# Altium footprint library WR-TBL_Pluggable Connector_3.50mm.PcbLib: 175 footprints (part 9 of 11)
Each footprint in its own frame and in the unit in brackets; x right, y up, seen from the top. Pads: shape width x height; smd on the part's side, far side on the other; paste and mask are expansions set on the pad; w line width, h text height; cw(c..) or ccw(c..) is an arc to the next point about the centre after c.
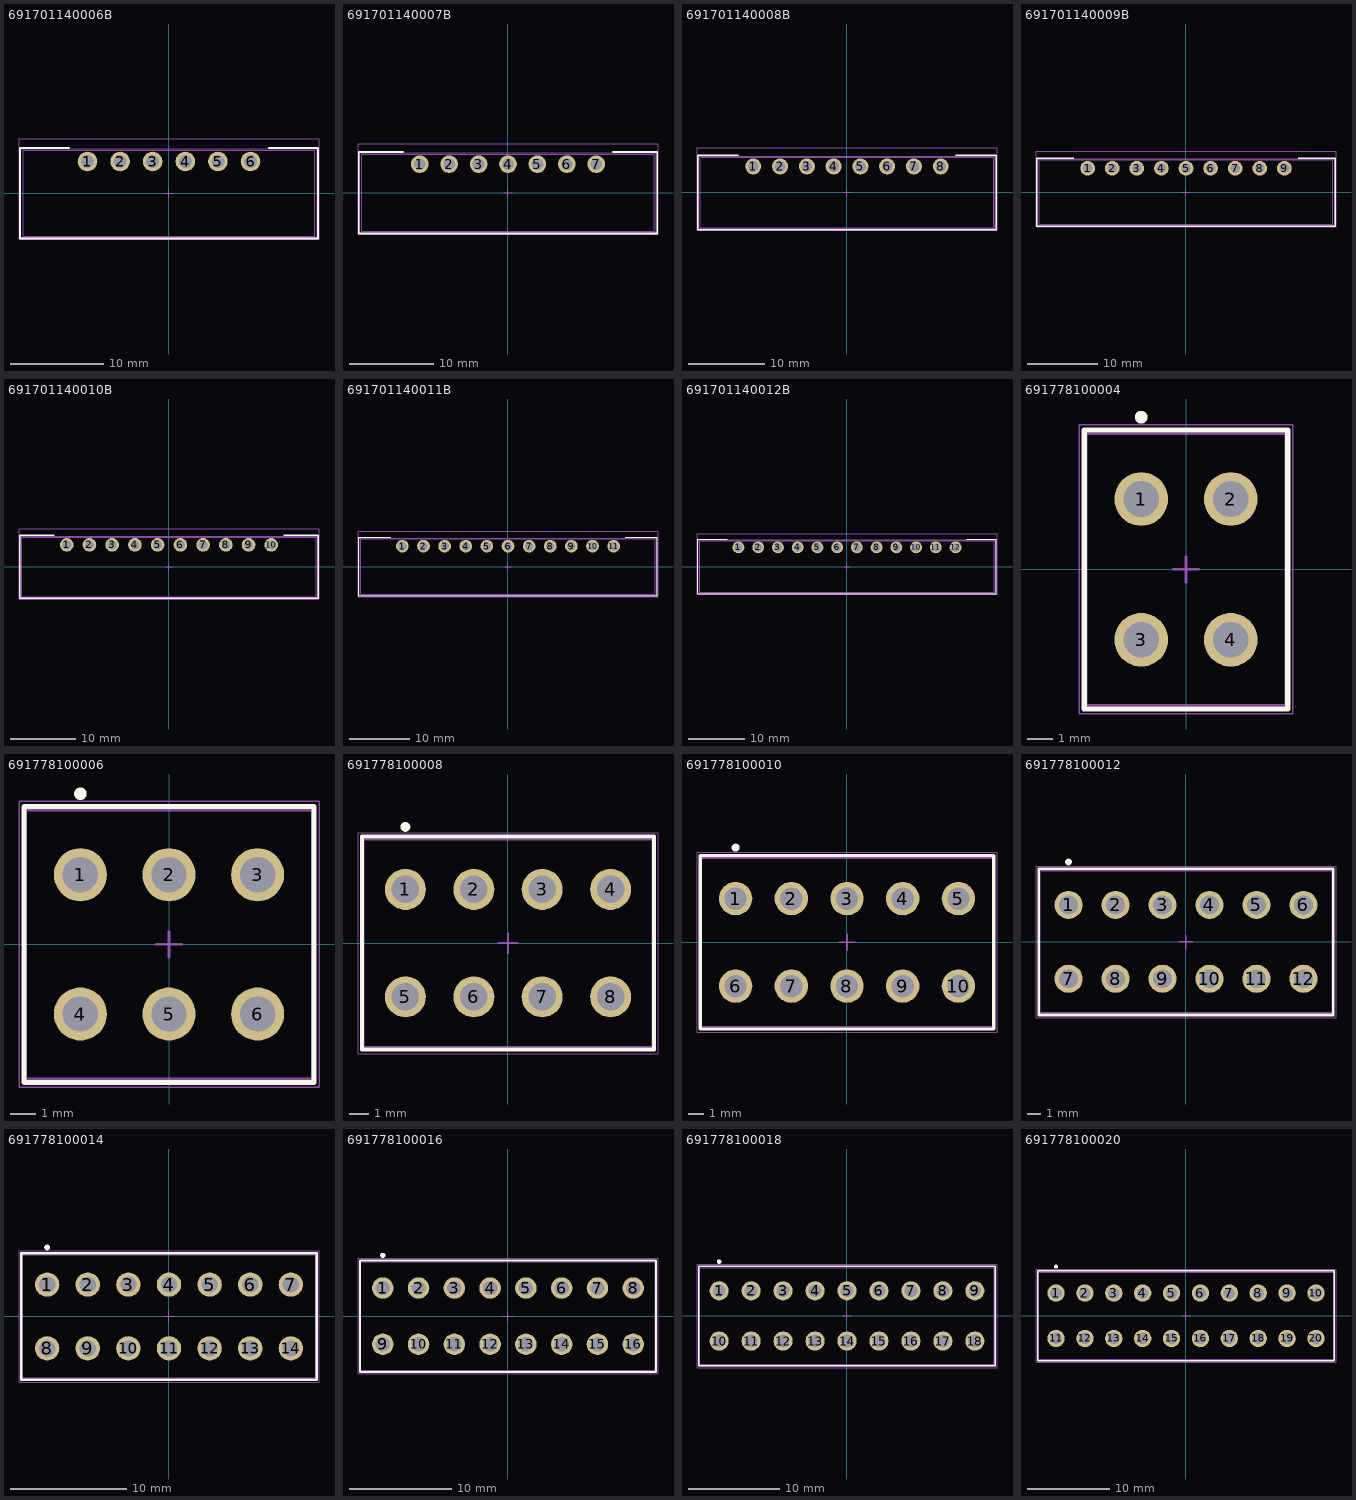
[diagram p8: the footprints below, top view; thin cyan lines are the x and y axes]

## 691701140006B [mm] "3.50 mm Horizontal PCB Header THR type with Flanges, 06p"
height 7
pads (6):
  round 2.1 hole 1.4: 1(-8.75,3.4) 2(-5.25,3.4) 3(-1.75,3.4) 4(1.75,3.4) 5(5.25,3.4) 6(8.75,3.4)
Top Overlay:
  lines w0.2: -10.7,4.85 -16,4.85 -16,-4.85 16,-4.85 16,4.85 10.7,4.85
Top Paste:
  region: 7.2,5.65 10.3,5.65 10.3,1.15 7.2,1.15
  region: 3.7,5.65 6.8,5.65 6.8,1.15 3.7,1.15
  region: 0.2,5.65 3.3,5.65 3.3,1.15 0.2,1.15
  region: -3.3,5.65 -0.2,5.65 -0.2,1.15 -3.3,1.15
  region: -6.8,5.65 -3.7,5.65 -3.7,1.15 -6.8,1.15
  region: -10.3,5.65 -7.2,5.65 -7.2,1.15 -10.3,1.15
Assembly Notes:
  text "Stencil thickness : 120 μm" at -5.156,-5.654 h1
Top Assembly:
  lines w0.1: -15.9,-4.75 15.9,-4.75 15.9,4.75 -15.9,4.75 -15.9,-4.75
Top Designator:
  text ".Designator" at -3.647,-0.357 h1
Top 3D Body:
  lines w0.1: -15.65,-4.6 15.65,-4.6 15.65,4.6 -15.65,4.6 -15.65,-4.6
Top Courtyard:
  lines w0.05: -16.1,-4.95 16.1,-4.95 16.1,5.85 -16.1,5.85 -16.1,-4.95
Top Component Center:
  lines w0.1: -0.5,0 0.5,0 ; 0,-0.5 0,0.5
3D body "691701140006B.stp": height 7.05, standoff -2.55, extent -15.65,-4.61 15.65,4.6

## 691701140007B [mm] "3.50 mm Horizontal PCB Header THR type with Flanges, 07p"
height 7
pads (7):
  round 2.1 hole 1.4: 1(-10.5,3.4) 2(-7,3.4) 3(-3.5,3.4) 4(0,3.4) 5(3.5,3.4) 6(7,3.4) 7(10.5,3.4)
Top Overlay:
  lines w0.2: -12.45,4.85 -17.75,4.85 -17.75,-4.85 17.75,-4.85 17.75,4.85 12.45,4.85
Top Paste:
  region: -12.05,5.65 -8.95,5.65 -8.95,1.15 -12.05,1.15
  region: -8.55,5.65 -5.45,5.65 -5.45,1.15 -8.55,1.15
  region: -5.05,5.65 -1.95,5.65 -1.95,1.15 -5.05,1.15
  region: -1.55,5.65 1.55,5.65 1.55,1.15 -1.55,1.15
  region: 1.95,5.65 5.05,5.65 5.05,1.15 1.95,1.15
  region: 5.45,5.65 8.55,5.65 8.55,1.15 5.45,1.15
  region: 8.95,5.65 12.05,5.65 12.05,1.15 8.95,1.15
Assembly Notes:
  text "Stencil thickness : 120 μm" at -5.156,-5.654 h1
Top Assembly:
  lines w0.1: -17.65,-4.75 17.65,-4.75 17.65,4.75 -17.65,4.75 -17.65,-4.75
Top Designator:
  text ".Designator" at -3.647,-0.357 h1
Top 3D Body:
  lines w0.1: -17.4,-4.6 17.4,-4.6 17.4,4.6 -17.4,4.6 -17.4,-4.6
Top Courtyard:
  lines w0.05: -17.85,-4.95 17.85,-4.95 17.85,5.85 -17.85,5.85 -17.85,-4.95
Top Component Center:
  lines w0.1: -0.5,0 0.5,0 ; 0,-0.5 0,0.5
3D body "691701140007B.stp": height 7.05, standoff -2.55, extent -17.4,-4.61 17.4,4.6

## 691701140008B [mm] "3.50 mm Horizontal PCB Header THR type with Flanges, 08p"
height 7
pads (8):
  round 2.1 hole 1.4: 1(-12.25,3.4) 2(-8.75,3.4) 3(-5.25,3.4) 4(-1.75,3.4) 5(1.75,3.4) 6(5.25,3.4) 7(8.75,3.4) 8(12.25,3.4)
Top Overlay:
  lines w0.2: -14.2,4.85 -19.5,4.85 -19.5,-4.85 19.5,-4.85 19.5,4.85 14.2,4.85
Top Paste:
  region: -13.8,5.65 -10.7,5.65 -10.7,1.15 -13.8,1.15
  region: -10.3,5.65 -7.2,5.65 -7.2,1.15 -10.3,1.15
  region: -6.8,5.65 -3.7,5.65 -3.7,1.15 -6.8,1.15
  region: -3.3,5.65 -0.2,5.65 -0.2,1.15 -3.3,1.15
  region: 0.2,5.65 3.3,5.65 3.3,1.15 0.2,1.15
  region: 3.7,5.65 6.8,5.65 6.8,1.15 3.7,1.15
  region: 7.2,5.65 10.3,5.65 10.3,1.15 7.2,1.15
  region: 10.7,5.65 13.8,5.65 13.8,1.15 10.7,1.15
Assembly Notes:
  text "Stencil thickness : 120 μm" at -5.156,-5.654 h1
Top Assembly:
  lines w0.1: -19.4,-4.75 19.4,-4.75 19.4,4.75 -19.4,4.75 -19.4,-4.75
Top Designator:
  text ".Designator" at -3.647,-0.357 h1
Top 3D Body:
  lines w0.1: -19.15,-4.6 19.15,-4.6 19.15,4.6 -19.15,4.6 -19.15,-4.6
Top Courtyard:
  lines w0.05: -19.6,-4.95 19.6,-4.95 19.6,5.85 -19.6,5.85 -19.6,-4.95
Top Component Center:
  lines w0.1: -0.5,0 0.5,0 ; 0,-0.5 0,0.5
3D body "691701140008B.stp": height 7.05, standoff -2.55, extent -19.15,-4.61 19.15,4.6

## 691701140009B [mm] "3.50 mm Horizontal PCB Header THR type with Flanges, 09p"
height 7
pads (9):
  round 2.1 hole 1.4: 1(-14,3.4) 2(-10.5,3.4) 3(-7,3.4) 4(-3.5,3.4) 5(0,3.4) 6(3.5,3.4) 7(7,3.4) 8(10.5,3.4) 9(14,3.4)
Top Overlay:
  lines w0.2: -15.95,4.85 -21.25,4.85 -21.25,-4.85 21.25,-4.85 21.25,4.85 15.95,4.85
Top Paste:
  region: 12.45,5.65 15.55,5.65 15.55,1.15 12.45,1.15
  region: 8.95,5.65 12.05,5.65 12.05,1.15 8.95,1.15
  region: 5.45,5.65 8.55,5.65 8.55,1.15 5.45,1.15
  region: 1.95,5.65 5.05,5.65 5.05,1.15 1.95,1.15
  region: -1.55,5.65 1.55,5.65 1.55,1.15 -1.55,1.15
  region: -5.05,5.65 -1.95,5.65 -1.95,1.15 -5.05,1.15
  region: -8.55,5.65 -5.45,5.65 -5.45,1.15 -8.55,1.15
  region: -12.05,5.65 -8.95,5.65 -8.95,1.15 -12.05,1.15
  region: -15.55,5.65 -12.45,5.65 -12.45,1.15 -15.55,1.15
Assembly Notes:
  text "Stencil thickness : 120 μm" at -5.156,-5.654 h1
Top Assembly:
  lines w0.1: -21.15,-4.75 -21.15,4.75 21.15,4.75 21.15,-4.75 -21.15,-4.75
Top Designator:
  text ".Designator" at -3.647,-0.357 h1
Top 3D Body:
  lines w0.1: -20.9,-4.6 -20.9,4.6 20.9,4.6 20.9,-4.6 -20.9,-4.6
Top Courtyard:
  lines w0.05: -21.35,-4.95 -21.35,5.85 21.35,5.85 21.35,-4.95 -21.35,-4.95
Top Component Center:
  lines w0.1: -0.5,0 0.5,0 ; 0,-0.5 0,0.5
3D body "691701140009B.stp": height 7.05, standoff -2.55, extent -20.9,-4.61 20.9,4.6

## 691701140010B [mm] "3.50 mm Horizontal PCB Header THR type with Flanges, 10p"
height 7
pads (10):
  round 2.1 hole 1.4: 1(-15.75,3.4) 2(-12.25,3.4) 3(-8.75,3.4) 4(-5.25,3.4) 5(-1.75,3.4) 6(1.75,3.4) 7(5.25,3.4) 8(8.75,3.4) 9(12.25,3.4) 10(15.75,3.4)
Top Overlay:
  lines w0.2: -17.7,4.85 -23,4.85 -23,-4.85 23,-4.85 23,4.85 17.7,4.85
Top Paste:
  region: -17.3,5.65 -14.2,5.65 -14.2,1.15 -17.3,1.15
  region: -13.8,5.65 -10.7,5.65 -10.7,1.15 -13.8,1.15
  region: -10.3,5.65 -7.2,5.65 -7.2,1.15 -10.3,1.15
  region: -6.8,5.65 -3.7,5.65 -3.7,1.15 -6.8,1.15
  region: -3.3,5.65 -0.2,5.65 -0.2,1.15 -3.3,1.15
  region: 0.2,5.65 3.3,5.65 3.3,1.15 0.2,1.15
  region: 3.7,5.65 6.8,5.65 6.8,1.15 3.7,1.15
  region: 7.2,5.65 10.3,5.65 10.3,1.15 7.2,1.15
  region: 10.7,5.65 13.8,5.65 13.8,1.15 10.7,1.15
  region: 14.2,5.65 17.3,5.65 17.3,1.15 14.2,1.15
Assembly Notes:
  text "Stencil thickness : 120 μm" at -5.156,-5.654 h1
Top Assembly:
  lines w0.1: -22.9,-4.75 -22.9,4.75 22.9,4.75 22.9,-4.75 -22.9,-4.75
Top Designator:
  text ".Designator" at -3.647,-0.357 h1
Top 3D Body:
  lines w0.1: -22.65,-4.6 -22.65,4.6 22.65,4.6 22.65,-4.6 -22.65,-4.6
Top Courtyard:
  lines w0.05: -23.1,-4.95 -23.1,5.85 23.1,5.85 23.1,-4.95 -23.1,-4.95
Top Component Center:
  lines w0.1: -0.5,0 0.5,0 ; 0,-0.5 0,0.5
3D body "691701140010B.stp": height 7.05, standoff -2.55, extent -22.65,-4.61 22.65,4.6

## 691701140011B [mm] "3.50 mm Horizontal PCB Header THR type with Flanges, 11p"
height 7
pads (11):
  round 2.1 hole 1.4: 1(-17.5,3.4) 2(-14,3.4) 3(-10.5,3.4) 4(-7,3.4) 5(-3.5,3.4) 6(0,3.4) 7(3.5,3.4) 8(7,3.4) 9(10.5,3.4) 10(14,3.4) 11(17.5,3.4)
Top Overlay:
  lines w0.2: -19.45,4.85 -24.75,4.85 -24.75,-4.85 24.75,-4.85 24.75,4.85 19.45,4.85
Top Paste:
  region: -19.05,5.65 -15.95,5.65 -15.95,1.15 -19.05,1.15
  region: -15.55,5.65 -12.45,5.65 -12.45,1.15 -15.55,1.15
  region: -12.05,5.65 -8.95,5.65 -8.95,1.15 -12.05,1.15
  region: -8.55,5.65 -5.45,5.65 -5.45,1.15 -8.55,1.15
  region: -5.05,5.65 -1.95,5.65 -1.95,1.15 -5.05,1.15
  region: -1.55,5.65 1.55,5.65 1.55,1.15 -1.55,1.15
  region: 1.95,5.65 5.05,5.65 5.05,1.15 1.95,1.15
  region: 5.45,5.65 8.55,5.65 8.55,1.15 5.45,1.15
  region: 8.95,5.65 12.05,5.65 12.05,1.15 8.95,1.15
  region: 12.45,5.65 15.55,5.65 15.55,1.15 12.45,1.15
  region: 15.95,5.65 19.05,5.65 19.05,1.15 15.95,1.15
Assembly Notes:
  text "Stencil thickness : 120 μm" at -5.156,-5.654 h1
Top Assembly:
  lines w0.1: -24.65,-4.75 -24.65,4.75 24.65,4.75 24.65,-4.75 -24.65,-4.75
Top Designator:
  text ".Designator" at -3.647,-0.357 h1
Top 3D Body:
  lines w0.1: -24.4,-4.6 -24.4,4.6 24.4,4.6 24.4,-4.6 -24.4,-4.6
Top Courtyard:
  lines w0.05: -24.85,-4.95 -24.85,5.85 24.85,5.85 24.85,-4.95 -24.85,-4.95
Top Component Center:
  lines w0.1: -0.5,0 0.5,0 ; 0,-0.5 0,0.5
3D body "691701140011B.stp": height 7.05, standoff -2.55, extent -24.4,-4.61 24.4,4.6

## 691701140012B [mm] "3.50 mm Horizontal PCB Header THR type with Flanges, 12p"
height 7
pads (12):
  round 2.1 hole 1.4: 1(-19.25,3.4) 2(-15.75,3.4) 3(-12.25,3.4) 4(-8.75,3.4) 5(-5.25,3.4) 6(-1.75,3.4) 7(1.75,3.4) 8(5.25,3.4) 9(8.75,3.4) 10(12.25,3.4) 11(15.75,3.4) 12(19.25,3.4)
Top Overlay:
  lines w0.2: -21.2,4.85 -26.5,4.85 -26.5,-4.85 26.5,-4.85 26.5,4.85 21.2,4.85
Top Paste:
  region: -20.8,5.65 -17.7,5.65 -17.7,1.15 -20.8,1.15
  region: -17.3,5.65 -14.2,5.65 -14.2,1.15 -17.3,1.15
  region: -13.8,5.65 -10.7,5.65 -10.7,1.15 -13.8,1.15
  region: -10.3,5.65 -7.2,5.65 -7.2,1.15 -10.3,1.15
  region: -6.8,5.65 -3.7,5.65 -3.7,1.15 -6.8,1.15
  region: -3.3,5.65 -0.2,5.65 -0.2,1.15 -3.3,1.15
  region: 0.2,5.65 3.3,5.65 3.3,1.15 0.2,1.15
  region: 3.7,5.65 6.8,5.65 6.8,1.15 3.7,1.15
  region: 7.2,5.65 10.3,5.65 10.3,1.15 7.2,1.15
  region: 10.7,5.65 13.8,5.65 13.8,1.15 10.7,1.15
  region: 14.2,5.65 17.3,5.65 17.3,1.15 14.2,1.15
  region: 17.7,5.65 20.8,5.65 20.8,1.15 17.7,1.15
Assembly Notes:
  text "Stencil thickness : 120 μm" at -5.156,-5.654 h1
Top Assembly:
  lines w0.1: -26.4,-4.75 -26.4,4.75 26.4,4.75 26.4,-4.75 -26.4,-4.75
Top Designator:
  text ".Designator" at -3.647,-0.357 h1
Top 3D Body:
  lines w0.1: -26.15,-4.6 -26.15,4.6 26.15,4.6 26.15,-4.6 -26.15,-4.6
Top Courtyard:
  lines w0.05: -26.6,-4.95 -26.6,5.85 26.6,5.85 26.6,-4.95 -26.6,-4.95
Top Component Center:
  lines w0.1: -0.5,0 0.5,0 ; 0,-0.5 0,0.5
3D body "691701140012B.stp": height 7.05, standoff -2.55, extent -26.15,-4.61 26.15,4.6

## 691778100004 [mm] "PCB Header, pitch 3.5mm, 04p"
height 10
pads (4):
  round 2.1 hole 1.4: 1(-1.75,2.75) 2(1.75,2.75) 3(-1.75,-2.75) 4(1.75,-2.75)
Top Overlay:
  circle w0.25: c-1.75,5.95 r0.125
  lines w0.2: -3.975,-5.45 3.975,-5.45 3.975,5.45 -3.975,5.45 -3.975,-5.45
Top Paste:
  region: 0.25,-0.45 3.25,-0.45 3.25,-5.05 0.25,-5.05
  region: -3.25,-0.45 -0.25,-0.45 -0.25,-5.05 -3.25,-5.05
  region: 0.25,5.05 3.25,5.05 3.25,0.45 0.25,0.45
  region: -3.25,5.05 -0.25,5.05 -0.25,0.45 -3.25,0.45
Top Assembly:
  lines w0.1: -3.975,-5.45 3.975,-5.45 3.975,5.45 -3.975,5.45 -3.975,-5.45
Top Designator:
  text ".Designator" at -3.647,-0.357 h1
Top 3D Body:
  lines w0.1: -3.9,-5.3 -3.9,5.3 3.9,5.3 3.9,-5.3 -3.9,-5.3
Top Courtyard:
  lines w0.05: -4.175,-5.65 -4.175,5.65 4.175,5.65 4.175,-5.65 -4.175,-5.65
Top Component Center:
  lines w0.1: -0.5,0 0.5,0 ; 0,-0.5 0,0.5
3D body "691778100004.stp": height 10.02, standoff -1.98, extent -3.9,-5.3 3.9,5.3

## 691778100006 [mm] "PCB Header, pitch 3.5mm, 06p"
height 10
pads (6):
  round 2.1 hole 1.4: 1(-3.5,2.75) 2(0,2.75) 3(3.5,2.75) 4(-3.5,-2.75) 5(0,-2.75) 6(3.5,-2.75)
Top Overlay:
  circle w0.25: c-3.5,5.95 r0.125
  lines w0.2: -5.725,-5.45 -5.725,5.45 5.725,5.45 5.725,-5.45 -5.725,-5.45
Top Paste:
  region: 2,-0.45 5,-0.45 5,-5.05 2,-5.05
  region: -1.5,-0.45 1.5,-0.45 1.5,-5.05 -1.5,-5.05
  region: -5,5.05 -2,5.05 -2,0.45 -5,0.45
  region: -1.5,5.05 1.5,5.05 1.5,0.45 -1.5,0.45
  region: 2,5.05 5,5.05 5,0.45 2,0.45
  region: -5,-0.45 -2,-0.45 -2,-5.05 -5,-5.05
Top Assembly:
  lines w0.1: -5.725,-5.45 -5.725,5.45 5.725,5.45 5.725,-5.45 -5.725,-5.45
Top Designator:
  text ".Designator" at -3.647,-0.357 h1
Top 3D Body:
  lines w0.1: -5.65,-5.3 5.65,-5.3 5.65,5.3 -5.65,5.3 -5.65,-5.3
Top Courtyard:
  lines w0.05: -5.925,-5.65 5.925,-5.65 5.925,5.65 -5.925,5.65 -5.925,-5.65
Top Component Center:
  lines w0.1: -0.5,0 0.5,0 ; 0,-0.5 0,0.5
3D body "691778100006.stp": height 10.02, standoff -2.73, extent -5.65,-5.3 5.65,5.3

## 691778100008 [mm] "PCB Header, pitch 3.5mm, 08p"
height 10
pads (8):
  round 2.1 hole 1.4: 1(-5.25,2.75) 2(-1.75,2.75) 3(1.75,2.75) 4(5.25,2.75) 5(-5.25,-2.75) 6(-1.75,-2.75) 7(1.75,-2.75) 8(5.25,-2.75)
Top Overlay:
  circle w0.25: c-5.25,5.95 r0.125
  lines w0.2: -7.475,-5.45 7.475,-5.45 7.475,5.45 -7.475,5.45 -7.475,-5.45
Top Paste:
  region: 3.75,5.05 6.75,5.05 6.75,0.45 3.75,0.45
  region: 0.25,5.05 3.25,5.05 3.25,0.45 0.25,0.45
  region: -3.25,5.05 -0.25,5.05 -0.25,0.45 -3.25,0.45
  region: -6.75,5.05 -3.75,5.05 -3.75,0.45 -6.75,0.45
  region: -6.75,-0.45 -3.75,-0.45 -3.75,-5.05 -6.75,-5.05
  region: -3.25,-0.45 -0.25,-0.45 -0.25,-5.05 -3.25,-5.05
  region: 0.25,-0.45 3.25,-0.45 3.25,-5.05 0.25,-5.05
  region: 3.75,-0.45 6.75,-0.45 6.75,-5.05 3.75,-5.05
Top Assembly:
  lines w0.1: -7.475,-5.45 7.475,-5.45 7.475,5.45 -7.475,5.45 -7.475,-5.45
Top Designator:
  text ".Designator" at -3.647,-0.357 h1
Top 3D Body:
  lines w0.1: -7.4,-5.3 -7.4,5.3 7.4,5.3 7.4,-5.3 -7.4,-5.3
Top Courtyard:
  lines w0.05: -7.675,-5.65 -7.675,5.65 7.675,5.65 7.675,-5.65 -7.675,-5.65
Top Component Center:
  lines w0.1: -0.5,0 0.5,0 ; 0,-0.5 0,0.5
3D body "691778100008.stp": height 10.02, standoff -2.73, extent -7.4,-5.3 7.4,5.3

## 691778100010 [mm] "PCB Header, pitch 3.5mm, 10p"
height 10
pads (10):
  round 2.1 hole 1.4: 1(-7,2.75) 2(-3.5,2.75) 3(0,2.75) 4(3.5,2.75) 5(7,2.75) 6(-7,-2.75) 7(-3.5,-2.75) 8(0,-2.75) 9(3.5,-2.75) 10(7,-2.75)
Top Overlay:
  circle w0.25: c-7,5.95 r0.125
  lines w0.2: -9.225,-5.45 9.225,-5.45 9.225,5.45 -9.225,5.45 -9.225,-5.45
Top Paste:
  region: 5.5,-0.45 8.5,-0.45 8.5,-5.05 5.5,-5.05
  region: 2,-0.45 5,-0.45 5,-5.05 2,-5.05
  region: 2,5.05 5,5.05 5,0.45 2,0.45
  region: -1.5,5.05 1.5,5.05 1.5,0.45 -1.5,0.45
  region: -5,5.05 -2,5.05 -2,0.45 -5,0.45
  region: -8.5,5.05 -5.5,5.05 -5.5,0.45 -8.5,0.45
  region: 5.5,5.05 8.5,5.05 8.5,0.45 5.5,0.45
  region: -8.5,-0.45 -5.5,-0.45 -5.5,-5.05 -8.5,-5.05
  region: -5,-0.45 -2,-0.45 -2,-5.05 -5,-5.05
  region: -1.5,-0.45 1.5,-0.45 1.5,-5.05 -1.5,-5.05
Top Assembly:
  lines w0.1: -9.225,-5.45 9.225,-5.45 9.225,5.45 -9.225,5.45 -9.225,-5.45
Top Designator:
  text ".Designator" at -3.647,-0.357 h1
Top 3D Body:
  lines w0.1: -9.15,-5.3 -9.15,5.3 9.15,5.3 9.15,-5.3 -9.15,-5.3
Top Courtyard:
  lines w0.05: -9.425,-5.65 -9.425,5.65 9.425,5.65 9.425,-5.65 -9.425,-5.65
Top Component Center:
  lines w0.1: -0.5,0 0.5,0 ; 0,-0.5 0,0.5
3D body "691778100010.stp": height 10.02, standoff -2.38, extent -9.15,-5.3 9.15,5.3

## 691778100012 [mm] "PCB Header, pitch 3.5mm, 12p"
height 10
pads (12):
  round 2.1 hole 1.4: 1(-8.75,2.75) 2(-5.25,2.75) 3(-1.75,2.75) 4(1.75,2.75) 5(5.25,2.75) 6(8.75,2.75) 7(-8.75,-2.75) 8(-5.25,-2.75) 9(-1.75,-2.75) 10(1.75,-2.75) 11(5.25,-2.75) 12(8.75,-2.75)
Top Overlay:
  circle w0.25: c-8.75,5.95 r0.125
  lines w0.2: -10.975,-5.45 10.975,-5.45 10.975,5.45 -10.975,5.45 -10.975,-5.45
Top Paste:
  region: 7.25,-0.45 10.25,-0.45 10.25,-5.05 7.25,-5.05
  region: 3.75,-0.45 6.75,-0.45 6.75,-5.05 3.75,-5.05
  region: 0.25,-0.45 3.25,-0.45 3.25,-5.05 0.25,-5.05
  region: -3.25,-0.45 -0.25,-0.45 -0.25,-5.05 -3.25,-5.05
  region: 0.25,5.05 3.25,5.05 3.25,0.45 0.25,0.45
  region: -3.25,5.05 -0.25,5.05 -0.25,0.45 -3.25,0.45
  region: -6.75,5.05 -3.75,5.05 -3.75,0.45 -6.75,0.45
  region: -10.25,5.05 -7.25,5.05 -7.25,0.45 -10.25,0.45
  region: 3.75,5.05 6.75,5.05 6.75,0.45 3.75,0.45
  region: 7.25,5.05 10.25,5.05 10.25,0.45 7.25,0.45
  region: -10.25,-0.45 -7.25,-0.45 -7.25,-5.05 -10.25,-5.05
  region: -6.75,-0.45 -3.75,-0.45 -3.75,-5.05 -6.75,-5.05
Top Assembly:
  lines w0.1: -10.975,-5.45 10.975,-5.45 10.975,5.45 -10.975,5.45 -10.975,-5.45
Top Designator:
  text ".Designator" at -3.647,-0.357 h1
Top 3D Body:
  lines w0.1: -10.9,-5.3 -10.9,5.3 10.9,5.3 10.9,-5.3 -10.9,-5.3
Top Courtyard:
  lines w0.05: -11.175,-5.65 -11.175,5.65 11.175,5.65 11.175,-5.65 -11.175,-5.65
Top Component Center:
  lines w0.1: -0.5,0 0.5,0 ; 0,-0.5 0,0.5
3D body "691778100012.stp": height 10.02, standoff -2.38, extent -10.9,-5.3 10.9,5.3

## 691778100014 [mm] "PCB Header, pitch 3.5mm, 14p"
height 10
pads (14):
  round 2.1 hole 1.4: 1(-10.5,2.75) 2(-7,2.75) 3(-3.5,2.75) 4(0,2.75) 5(3.5,2.75) 6(7,2.75) 7(10.5,2.75) 8(-10.5,-2.75) 9(-7,-2.75) 10(-3.5,-2.75) 11(0,-2.75) 12(3.5,-2.75) 13(7,-2.75) 14(10.5,-2.75)
Top Overlay:
  circle w0.25: c-10.5,5.95 r0.125
  lines w0.2: -12.725,-5.45 -12.725,5.45 12.725,5.45 12.725,-5.45 -12.725,-5.45
Top Paste:
  region: 9,-0.45 12,-0.45 12,-5.05 9,-5.05
  region: 5.5,-0.45 8.5,-0.45 8.5,-5.05 5.5,-5.05
  region: -12,-0.45 -9,-0.45 -9,-5.05 -12,-5.05
  region: 9,5.05 12,5.05 12,0.45 9,0.45
  region: 5.5,5.05 8.5,5.05 8.5,0.45 5.5,0.45
  region: 2,5.05 5,5.05 5,0.45 2,0.45
  region: -12,5.05 -9,5.05 -9,0.45 -12,0.45
  region: -8.5,5.05 -5.5,5.05 -5.5,0.45 -8.5,0.45
  region: -5,5.05 -2,5.05 -2,0.45 -5,0.45
  region: -1.5,5.05 1.5,5.05 1.5,0.45 -1.5,0.45
  region: -8.5,-0.45 -5.5,-0.45 -5.5,-5.05 -8.5,-5.05
  region: -5,-0.45 -2,-0.45 -2,-5.05 -5,-5.05
  region: -1.5,-0.45 1.5,-0.45 1.5,-5.05 -1.5,-5.05
  region: 2,-0.45 5,-0.45 5,-5.05 2,-5.05
Top Assembly:
  lines w0.1: -12.725,-5.45 -12.725,5.45 12.725,5.45 12.725,-5.45 -12.725,-5.45
Top Designator:
  text ".Designator" at -3.647,-0.357 h1
Top 3D Body:
  lines w0.1: -12.65,-5.3 12.65,-5.3 12.65,5.3 -12.65,5.3 -12.65,-5.3
Top Courtyard:
  lines w0.05: -12.925,-5.65 12.925,-5.65 12.925,5.65 -12.925,5.65 -12.925,-5.65
Top Component Center:
  lines w0.1: -0.5,0 0.5,0 ; 0,-0.5 0,0.5
3D body "691778100014.stp": height 10.02, standoff -2.73, extent -12.65,-5.3 12.65,5.3

## 691778100016 [mm] "PCB Header, pitch 3.5mm, 16p"
height 10
pads (16):
  round 2.1 hole 1.4: 1(-12.25,2.75) 2(-8.75,2.75) 3(-5.25,2.75) 4(-1.75,2.75) 5(1.75,2.75) 6(5.25,2.75) 7(8.75,2.75) 8(12.25,2.75) 9(-12.25,-2.75) 10(-8.75,-2.75) 11(-5.25,-2.75) 12(-1.75,-2.75) 13(1.75,-2.75) 14(5.25,-2.75) 15(8.75,-2.75) 16(12.25,-2.75)
Top Overlay:
  circle w0.25: c-12.25,5.95 r0.125
  lines w0.2: -14.475,-5.45 14.475,-5.45 14.475,5.45 -14.475,5.45 -14.475,-5.45
Top Paste:
  region: -3.25,-0.45 -0.25,-0.45 -0.25,-5.05 -3.25,-5.05
  region: -6.75,-0.45 -3.75,-0.45 -3.75,-5.05 -6.75,-5.05
  region: -10.25,-0.45 -7.25,-0.45 -7.25,-5.05 -10.25,-5.05
  region: -13.75,-0.45 -10.75,-0.45 -10.75,-5.05 -13.75,-5.05
  region: -3.25,5.05 -0.25,5.05 -0.25,0.45 -3.25,0.45
  region: -6.75,5.05 -3.75,5.05 -3.75,0.45 -6.75,0.45
  region: -10.25,5.05 -7.25,5.05 -7.25,0.45 -10.25,0.45
  region: -13.75,5.05 -10.75,5.05 -10.75,0.45 -13.75,0.45
  region: 0.25,5.05 3.25,5.05 3.25,0.45 0.25,0.45
  region: 3.75,5.05 6.75,5.05 6.75,0.45 3.75,0.45
  region: 7.25,5.05 10.25,5.05 10.25,0.45 7.25,0.45
  region: 10.75,5.05 13.75,5.05 13.75,0.45 10.75,0.45
  region: 0.25,-0.45 3.25,-0.45 3.25,-5.05 0.25,-5.05
  region: 3.75,-0.45 6.75,-0.45 6.75,-5.05 3.75,-5.05
  region: 7.25,-0.45 10.25,-0.45 10.25,-5.05 7.25,-5.05
  region: 10.75,-0.45 13.75,-0.45 13.75,-5.05 10.75,-5.05
Top Assembly:
  lines w0.1: -14.475,-5.45 14.475,-5.45 14.475,5.45 -14.475,5.45 -14.475,-5.45
Top Designator:
  text ".Designator" at -3.647,-0.357 h1
Top 3D Body:
  lines w0.1: -14.4,-5.3 -14.4,5.3 14.4,5.3 14.4,-5.3 -14.4,-5.3
Top Courtyard:
  lines w0.05: -14.675,-5.65 -14.675,5.65 14.675,5.65 14.675,-5.65 -14.675,-5.65
Top Component Center:
  lines w0.1: -0.5,0 0.5,0 ; 0,-0.5 0,0.5
3D body "691778100016.stp": height 10.02, standoff -2.73, extent -14.4,-5.3 14.4,5.3

## 691778100018 [mm] "PCB Header, pitch 3.5mm, 18p"
height 10
pads (18):
  round 2.1 hole 1.4: 1(-14,2.75) 2(-10.5,2.75) 3(-7,2.75) 4(-3.5,2.75) 5(0,2.75) 6(3.5,2.75) 7(7,2.75) 8(10.5,2.75) 9(14,2.75) 10(-14,-2.75) 11(-10.5,-2.75) 12(-7,-2.75) 13(-3.5,-2.75) 14(0,-2.75) 15(3.5,-2.75) 16(7,-2.75) 17(10.5,-2.75) 18(14,-2.75)
Top Overlay:
  circle w0.25: c-14,5.95 r0.125
  lines w0.2: -16.225,-5.45 16.225,-5.45 16.225,5.45 -16.225,5.45 -16.225,-5.45
Top Paste:
  region: -8.5,-0.45 -5.5,-0.45 -5.5,-5.05 -8.5,-5.05
  region: -12,-0.45 -9,-0.45 -9,-5.05 -12,-5.05
  region: -15.5,-0.45 -12.5,-0.45 -12.5,-5.05 -15.5,-5.05
  region: 12.5,5.05 15.5,5.05 15.5,0.45 12.5,0.45
  region: -5,5.05 -2,5.05 -2,0.45 -5,0.45
  region: -8.5,5.05 -5.5,5.05 -5.5,0.45 -8.5,0.45
  region: -12,5.05 -9,5.05 -9,0.45 -12,0.45
  region: -15.5,5.05 -12.5,5.05 -12.5,0.45 -15.5,0.45
  region: -1.5,5.05 1.5,5.05 1.5,0.45 -1.5,0.45
  region: 2,5.05 5,5.05 5,0.45 2,0.45
  region: 5.5,5.05 8.5,5.05 8.5,0.45 5.5,0.45
  region: 9,5.05 12,5.05 12,0.45 9,0.45
  region: -5,-0.45 -2,-0.45 -2,-5.05 -5,-5.05
  region: -1.5,-0.45 1.5,-0.45 1.5,-5.05 -1.5,-5.05
  region: 2,-0.45 5,-0.45 5,-5.05 2,-5.05
  region: 5.5,-0.45 8.5,-0.45 8.5,-5.05 5.5,-5.05
  region: 9,-0.45 12,-0.45 12,-5.05 9,-5.05
  region: 12.5,-0.45 15.5,-0.45 15.5,-5.05 12.5,-5.05
Top Assembly:
  lines w0.1: -16.225,-5.45 16.225,-5.45 16.225,5.45 -16.225,5.45 -16.225,-5.45
Top Designator:
  text ".Designator" at -3.647,-0.357 h1
Top 3D Body:
  lines w0.1: -16.15,-5.3 -16.15,5.3 16.15,5.3 16.15,-5.3 -16.15,-5.3
Top Courtyard:
  lines w0.05: -16.425,-5.65 -16.425,5.65 16.425,5.65 16.425,-5.65 -16.425,-5.65
Top Component Center:
  lines w0.1: -0.5,0 0.5,0 ; 0,-0.5 0,0.5
3D body "691778100018.stp": height 10.02, standoff -2.73, extent -16.15,-5.3 16.15,5.3

## 691778100020 [mm] "PCB Header, pitch 3.5mm, 20p"
height 10
pads (20):
  round 2.1 hole 1.4: 1(-15.75,2.75) 2(-12.25,2.75) 3(-8.75,2.75) 4(-5.25,2.75) 5(-1.75,2.75) 6(1.75,2.75) 7(5.25,2.75) 8(8.75,2.75) 9(12.25,2.75) 10(15.75,2.75) 11(-15.75,-2.75) 12(-12.25,-2.75) 13(-8.75,-2.75) 14(-5.25,-2.75) 15(-1.75,-2.75) 16(1.75,-2.75) 17(5.25,-2.75) 18(8.75,-2.75) 19(12.25,-2.75) 20(15.75,-2.75)
Top Overlay:
  circle w0.25: c-15.75,5.95 r0.125
  lines w0.2: -17.975,-5.45 17.975,-5.45 17.975,5.45 -17.975,5.45 -17.975,-5.45
Top Paste:
  region: -13.75,-0.45 -10.75,-0.45 -10.75,-5.05 -13.75,-5.05
  region: -17.25,-0.45 -14.25,-0.45 -14.25,-5.05 -17.25,-5.05
  region: 14.25,5.05 17.25,5.05 17.25,0.45 14.25,0.45
  region: 10.75,5.05 13.75,5.05 13.75,0.45 10.75,0.45
  region: -6.75,5.05 -3.75,5.05 -3.75,0.45 -6.75,0.45
  region: -10.25,5.05 -7.25,5.05 -7.25,0.45 -10.25,0.45
  region: -13.75,5.05 -10.75,5.05 -10.75,0.45 -13.75,0.45
  region: -17.25,5.05 -14.25,5.05 -14.25,0.45 -17.25,0.45
  region: -3.25,5.05 -0.25,5.05 -0.25,0.45 -3.25,0.45
  region: 0.25,5.05 3.25,5.05 3.25,0.45 0.25,0.45
  region: 3.75,5.05 6.75,5.05 6.75,0.45 3.75,0.45
  region: 7.25,5.05 10.25,5.05 10.25,0.45 7.25,0.45
  region: -10.25,-0.45 -7.25,-0.45 -7.25,-5.05 -10.25,-5.05
  region: -6.75,-0.45 -3.75,-0.45 -3.75,-5.05 -6.75,-5.05
  region: -3.25,-0.45 -0.25,-0.45 -0.25,-5.05 -3.25,-5.05
  region: 0.25,-0.45 3.25,-0.45 3.25,-5.05 0.25,-5.05
  region: 3.75,-0.45 6.75,-0.45 6.75,-5.05 3.75,-5.05
  region: 7.25,-0.45 10.25,-0.45 10.25,-5.05 7.25,-5.05
  region: 10.75,-0.45 13.75,-0.45 13.75,-5.05 10.75,-5.05
  region: 14.25,-0.45 17.25,-0.45 17.25,-5.05 14.25,-5.05
Top Assembly:
  lines w0.1: -17.975,-5.45 17.975,-5.45 17.975,5.45 -17.975,5.45 -17.975,-5.45
Top Designator:
  text ".Designator" at -3.647,-0.357 h1
Top 3D Body:
  lines w0.1: -17.9,-5.3 -17.9,5.3 17.9,5.3 17.9,-5.3 -17.9,-5.3
Top Courtyard:
  lines w0.05: -18.175,-5.65 -18.175,5.65 18.175,5.65 18.175,-5.65 -18.175,-5.65
Top Component Center:
  lines w0.1: -0.5,0 0.5,0 ; 0,-0.5 0,0.5
3D body "691778100020.stp": height 10.02, standoff -2.73, extent -17.9,-5.3 17.9,5.3